# Altium footprint library Resistores_PTH_RES-40.PcbLib: 13 footprints
Each footprint in its own frame and in the unit in brackets; x right, y up, seen from the top. Pads: shape width x height; smd on the part's side, far side on the other; paste and mask are expansions set on the pad; w line width, h text height; cw(c..) or ccw(c..) is an arc to the next point about the centre after c.
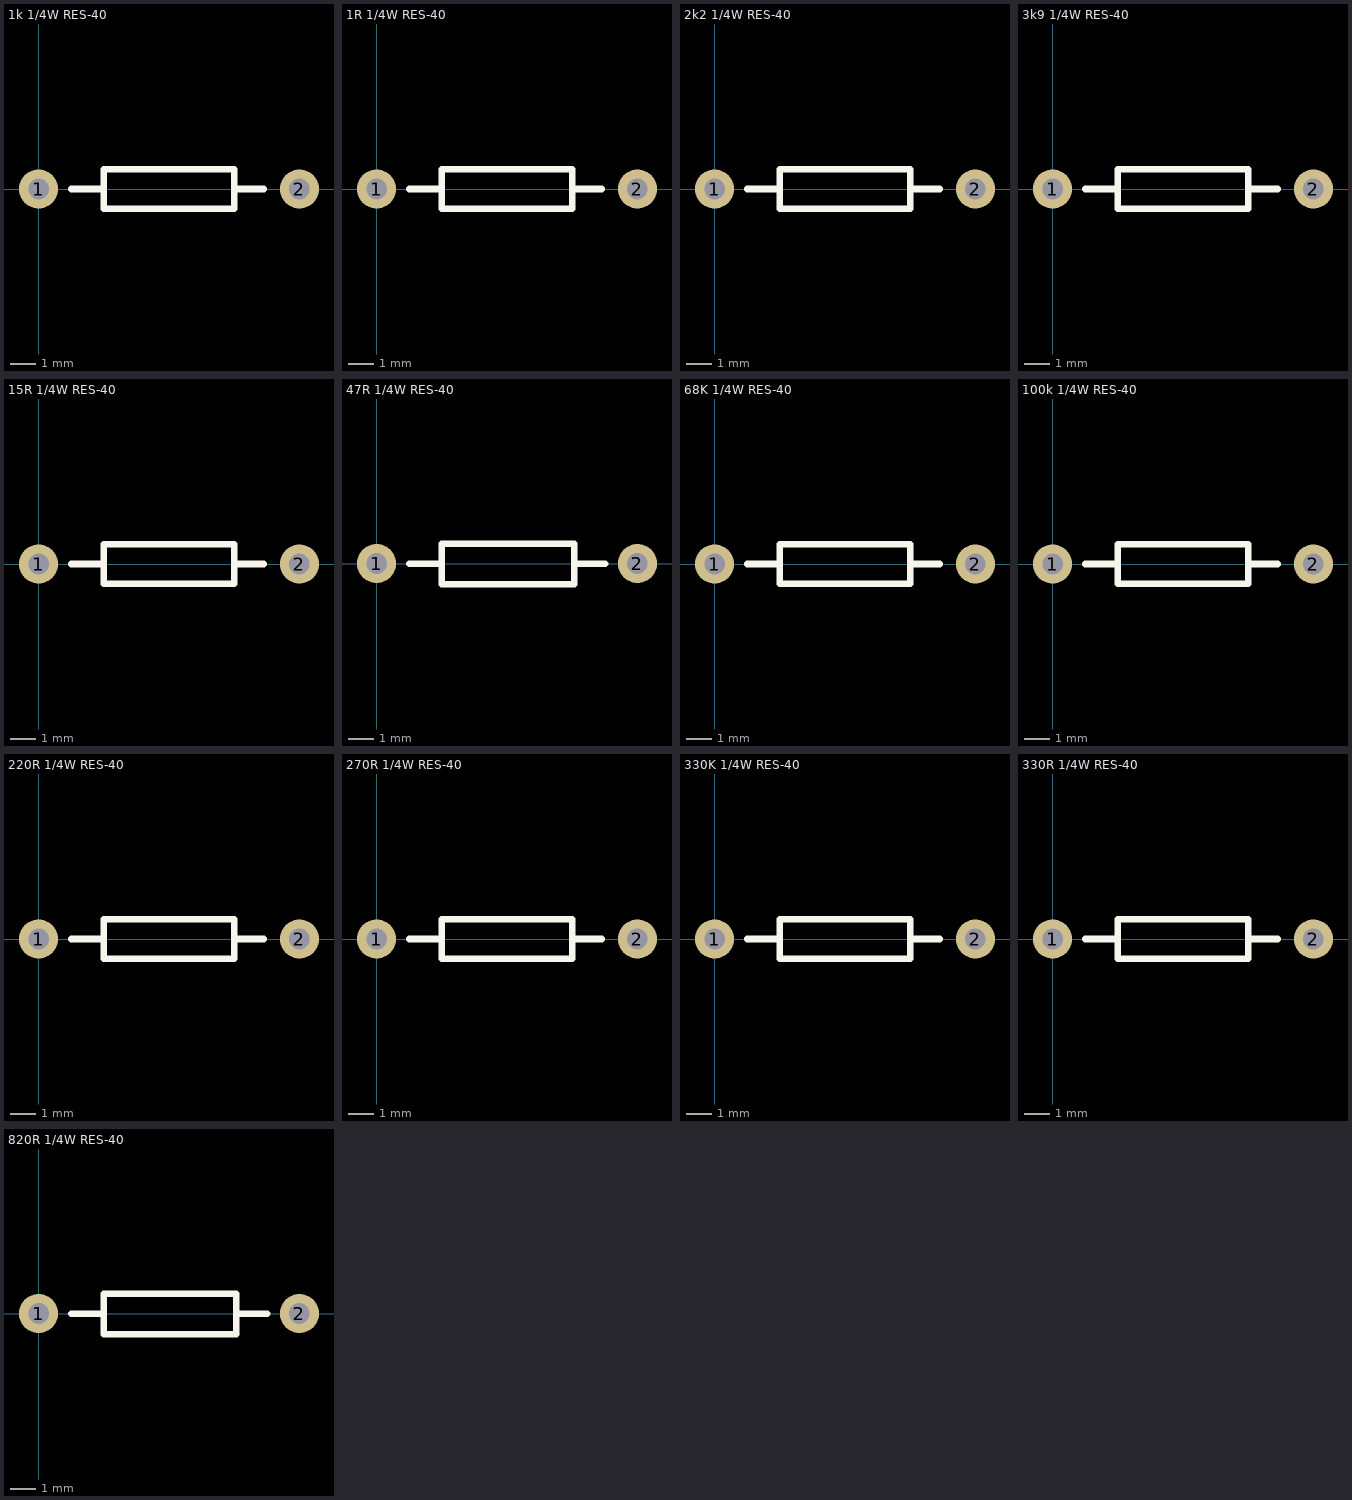
[diagram p0: the footprints below, top view; thin cyan lines are the x and y axes]

## 1k 1/4W RES-40 [mil]
pads (2):
  round 60 hole 31.5: 1(0,0) 2(400,0)
Top Overlay:
  lines w10: 50,0 100,0 ; 300,0 345,0 ; 100,0 100,-30 300,-30 300,30 100,30 100,0
3D body "1k 0.4.STEP": height 125.5, standoff -90, extent -12,-45 412,46

## 1R 1/4W RES-40 [mil]
pads (2):
  round 60 hole 31.5: 1(0,0) 2(400,0)
Top Overlay:
  lines w10: 50,0 100,0 ; 300,0 345,0 ; 100,0 100,-30 300,-30 300,30 100,30 100,0
3D body "1R 0.4.STEP": height 125.5, standoff -90, extent -12,-45 412,46

## 2k2 1/4W RES-40 [mil]
pads (2):
  round 60 hole 31.5: 1(0,0) 2(400,0)
Top Overlay:
  lines w10: 50,0 100,0 ; 300,0 345,0 ; 100,0 100,-30 300,-30 300,30 100,30 100,0
3D body "2k2 0.4.STEP": height 125.5, standoff -90, extent -12,-45 412,46

## 3k9 1/4W RES-40 [mil]
pads (2):
  round 60 hole 31.5: 1(0,0) 2(400,0)
Top Overlay:
  lines w10: 50,0 100,0 ; 300,0 345,0 ; 100,0 100,30 300,30 300,-30 100,-30 100,0
3D body "3k9 0.4.STEP": height 125.5, standoff -90, extent -12,-45 412,46

## 15R 1/4W RES-40 [mil]
pads (2):
  round 60 hole 31.5: 1(0,0) 2(400,0)
Top Overlay:
  lines w10: 50,0 100,0 ; 300,0 345,0 ; 100,0 100,30 300,30 300,-30 100,-30 100,0
3D body "15R 0.4.STEP": height 125.5, standoff -90, extent -12,-45 412,46

## 47R 1/4W RES-40 [mil]
pads (2):
  round 60 hole 31.5 unplated: 1(0,0) 2(400,0)
Top Overlay:
  lines w10: 50,0 100,0 ; 305.91,0 350.39,0 ; 100,0 100,30 303.15,30 303.15,-31.5 100,-31.5 100,0
3D body "47R 0.4.STEP": height 115.5, standoff -100, extent -11.99,-45.5 412.01,45.5

## 68K 1/4W RES-40 [mil]
pads (2):
  round 60 hole 31.5: 1(0,0) 2(400,0)
Top Overlay:
  lines w10: 50,0 100,0 ; 300,0 345,0 ; 100,0 100,-30 300,-30 300,30 100,30 100,0
3D body "68k 0.4.STEP": height 125.5, standoff -90, extent -12,-45 412,46

## 100k 1/4W RES-40 [mil]
pads (2):
  round 60 hole 31.5: 1(0,0) 2(400,0)
Top Overlay:
  lines w10: 50,0 100,0 ; 300,0 345,0 ; 100,0 100,30 300,30 300,-30 100,-30 100,0
3D body "100kR 0.4.STEP": height 125.5, standoff -90, extent -12,-45 412,46

## 220R 1/4W RES-40 [mil]
pads (2):
  round 60 hole 31.5: 1(0,0) 2(400,0)
Top Overlay:
  lines w10: 50,0 100,0 ; 300,0 345,0 ; 100,0 100,-30 300,-30 300,30 100,30 100,0
3D body "220R 0.4.STEP": height 125.5, standoff -90, extent -12,-45 412,46

## 270R 1/4W RES-40 [mil]
pads (2):
  round 60 hole 31.5: 1(0,0) 2(400,0)
Top Overlay:
  lines w10: 50,0 100,0 ; 300,0 345,0 ; 100,0 100,30 300,30 300,-30 100,-30 100,0
3D body "270R 0.4.STEP": height 125.5, standoff -90, extent -12,-45 412,46

## 330K 1/4W RES-40 [mil]
pads (2):
  round 60 hole 31.5: 1(0,0) 2(400,0)
Top Overlay:
  lines w10: 50,0 100,0 ; 300,0 345,0 ; 100,0 100,30 300,30 300,-30 100,-30 100,0
3D body "330k 0.4.STEP": height 125.5, standoff -90, extent -12,-45 412,46

## 330R 1/4W RES-40 [mil]
pads (2):
  round 60 hole 31.5: 1(0,0) 2(400,0)
Top Overlay:
  lines w10: 50,0 100,0 ; 300,0 345,0 ; 100,0 100,-30 300,-30 300,30 100,30 100,0
3D body "330R 0.4.STEP": height 125.5, standoff -90, extent -12,-45 412,46

## 820R 1/4W RES-40 [mil]
pads (2):
  round 60 hole 31.5 unplated: 1(0,0) 2(400,0)
Top Overlay:
  lines w10: 50,0 100,0 ; 305.91,0 350.39,0 ; 100,0 100,-31.5 303.15,-31.5 303.15,30 100,30 100,0
3D body "820R 0.4.STEP": height 115.5, standoff -100, extent -11.99,-45.5 412.01,45.5